# Altium integrated library loz-old-man.IntLib: 86 symbols (part 1 of 3)
Pins are listed as number, name and electrical type; pins without a type are passive.

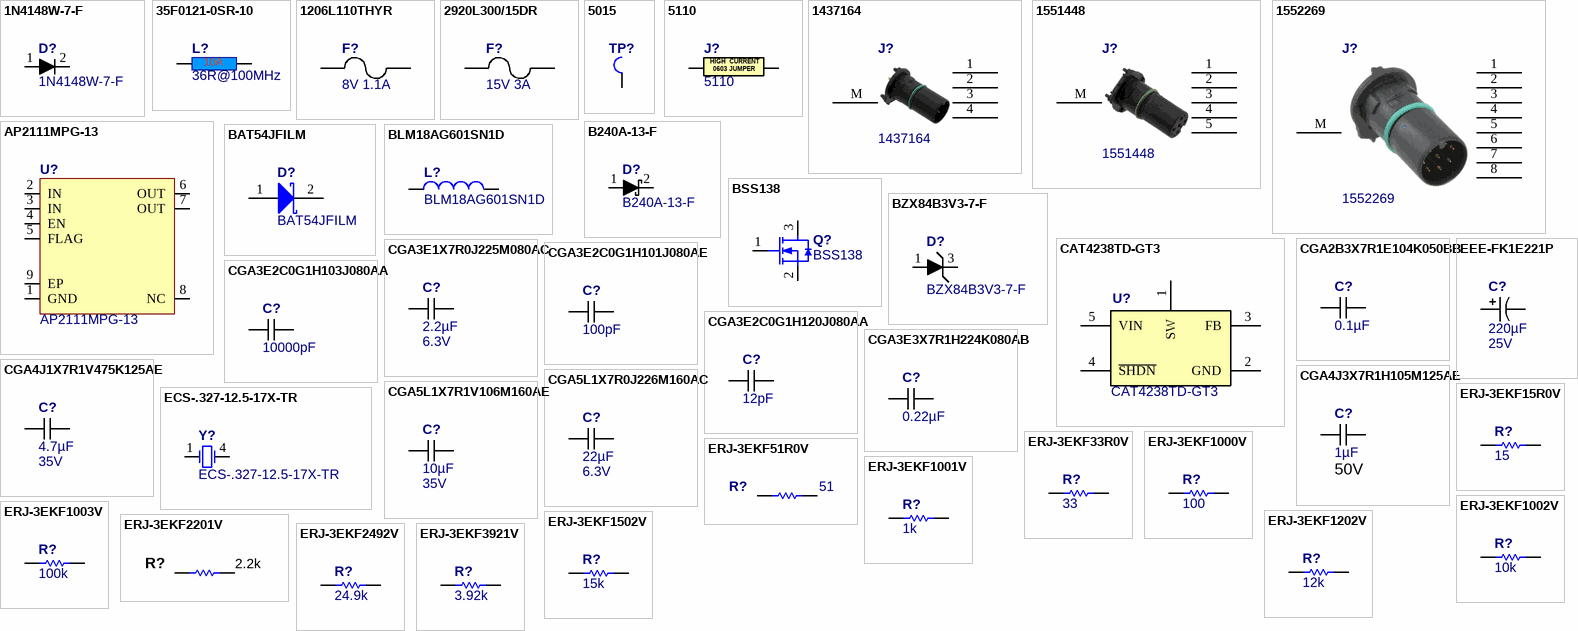
[diagram p0: symbols 1N4148W-7-F to ERJ-3EKF3921V]

## 1N4148W-7-F
designator D?
DIODE SWITCH 100V 150MA SOD123; Manufacturer: Diodes Inc; CategorySort: 400; Diode Type: Standard; Voltage - Forward (Vf) (Max) @ If: 1.25V @ 150mA; Speed: Small Signal =< 200mA (Io)- Any Speed; Reverse Recovery Time (trr): 4ns; Current - Reverse Leakage @ Vr: 1µA @ 75V; Capacitance @ Vr- F: 2pF @ 0V- 1MHz; Num Pins: 2; Diode Suffix: 1A_2C; Category: Diodes; Value: 1N4148W-7-F; Manufacturer Part Number: 1N4148W-7-F; ComponentLink1Description: Internal Datasheet; ComponentLink1URL: http://www.diodes.com/datasheets/ds30086.pdf; ComponentLink2Description: External Datasheet; ComponentLink2URL: http://www.diodes.com/datasheets/ds30086.pdf; Supplier 1: Digi-Key; Supplier Part Number 1: 1N4148W-FDICT-ND; SortValue: 1N4148W-7-F; Voltage - DC Reverse (Vr) (Max): 100V; Current - Average Rectified (Io): 150mA; Mounting Type: Surface Mount; Package: SOD-123; Supplier Device Package: SOD-123; Packaging: Cut Tape (CT)
footprint D_SOD-123_P
footprint -
pins: 1 A, 2 K

## 35F0121-0SR-10
designator L?, comment 36R@100MHz
Power Supply FB 10A; Manufacturer Part No.: 35F0121-0SR-10; Manufacturer Name: Laird; Manufacturer: Laird Steward; Tolerance: 25%; Core Material: Ferrite; Impedance: 41R; Resistance: 42R; Number of Lines: 1; DC Resistance (DCR): 0.75mR; Test Frequency: 100MHz; Frequency: 10MHz; Rating: 10A; Supplier 1: Digi-Key; Supplier Part Number 1: 240-2520-1-ND; Manufacturer Part Number: 35F0121-0SR-10; Stock: 289479; Pricing: 1 = 0.29000, 10 = 0.22600, 25 = 0.18760, 50 = 0.16160, 100 = 0.14540, 250 = 0.12280, 500 = 0.10988, 1000 = 0.09371 (USD); Mount: Surface Mount; Case/Package: SMD/SMT; Weight: 0.00512oz; Case Code (Metric): 4131; Case Code (Imperial): 1612; Min Operating Temperature: -40°C; Max Operating Temperature: 125°C; Package Quantity: 2500; Packaging: Tape and Reel; Max Current Rating: 10A; Max DC Current: 10A; Termination: SMD/SMT; Length: 0.16inch; Height: 0.12inch; Width: 0.12inch; Depth: 3.05mm; Lead Free: Lead Free; ComponentLink1URL: http://lairdtech.thomasnet.com/Asset/35F0121-0SR-10-C-2-VP.pdf; ComponentLink1Description: http://lairdtech.thomasnet.com/Asset/35F0121-0SR-10-C-2-VP.pdf; ComponentLink2URL: http://datasheet.octopart.com/35F0121-0SR-10-Steward-datasheet-65778.pdf; ComponentLink2Description: http://datasheet.octopart.com/35F0121-0SR-10-Steward-datasheet-65778.pdf; ComponentLink3URL: http://datasheet.octopart.com/35F0121-0SR-10-Steward-datasheet-153820.pdf; ComponentLink3Description: http://datasheet.octopart.com/35F0121-0SR-10-Steward-datasheet-153820.pdf; ComponentLink4URL: http://datasheet.octopart.com/35F0121-0SR-10-Steward-datasheet-14434158.pdf; ComponentLink4Description: http://datasheet.octopart.com/35F0121-0SR-10-Steward-datasheet-14434158.pdf; Value: 36R@100MHz
footprint T_Laird_35F0121-0SR-10 (Power supply FB 10A)
pins: 1, 2

## 1206L110THYR
designator F?, comment 8V 1.1A
FUSE PTC RESET 8V 1.10A 1206; Manufacturer Part Number: 1206L110THYR; Manufacturer: Littelfuse Inc; CategorySort: 850; Current - Trip (It): 2.2A; Current - Max: 100A; R Min/Max: 0.040 ~ 0.180 Ohm; Time to Trip: 0.1s; Current Trip: 1.1; Value: 8V 1.1A; Sort Value: *; Category: Circuit Protection; ComponentLink1Description: Internal Datasheet; ComponentLink1URL: http://www.littelfuse.com/data/en/Data_Sheets/Littelfuse_PTC_1206L.pdf; ComponentLink2Description: External Datasheet; ComponentLink2URL: http://www.littelfuse.com/data/en/Data_Sheets/Littelfuse_PTC_1206L.pdf; Supplier 1: Digi-Key; Supplier Part Number 1: F3371CT-ND; SortValue: 8_1.1; Current - Hold (Ih) (Max): 1.1A; Voltage - Max: 8V; Package: 1206 (3216 Metric)- Concave- Long Side Terminals; Packaging: Cut Tape (CT); Footprint: 1206
footprint F_PTC_1206
footprint -
pins: 1, 2

## 2920L300/15DR
designator F?, comment 15V 3A
PTC RESETTABLE 15V 3A SMD 2920; Manufacturer Part Number: 2920L300/15DR; Manufacturer: Littelfuse Inc; CategorySort: 850; Current - Trip (It): 5A; Current - Max: 40A; R Min/Max: 0.015 ~ 0.048 Ohm; Time to Trip: 20s; Current Trip: 3; Value: 15V 3A; Sort Value: *; Category: Circuit Protection; ComponentLink1Description: Internal Datasheet; ComponentLink1URL: http://www.littelfuse.com/data/en/Data_Sheets/Littelfuse_PTC_2920L.pdf; ComponentLink2Description: External Datasheet; ComponentLink2URL: http://www.littelfuse.com/data/en/Data_Sheets/Littelfuse_PTC_2920L.pdf; Supplier 1: Digi-Key; Supplier Part Number 1: F2875CT-ND; SortValue: 15_3; Current - Hold (Ih) (Max): 3A; Voltage - Max: 15V; Package: 2920 (7351 Metric)- Concave; Packaging: Cut Tape (CT); Footprint: 2920
footprint F_PTC_2920
footprint -
pins: 1, 2

## 5015
designator TP?, comment PC TEST POINT MINIATURE SMT  (value not drawn)
Manufacturer: Keystone Electronics; Manufacturer Part Number: 5015; ROHS Certificate: *; Value: PC TEST POINT MINIATURE SMT; Pricing: *; Supplier 1: Digi-Key; Supplier Part Number 1: 36-5015CT-ND; RoHS: RoHS Compliant; Category: Test and Measurement; Type: PC Test Point, Miniature; Terminal: 0.010" (0.25mm) Phosphor Bronze, Silver Plate; Mounting Type: Surface Mount; Material: Phosphor Bronze; Color: -; Packaging: Cut Tape (CT); ComponentLink1URL: http://mail.keyelco.com/ENG._DEPT/PDF%20CAT%20NO%20Drawings/5015.pdf; ComponentLink1Description: http://mail.keyelco.com/ENG._DEPT/PDF%20CAT%20NO%20Drawings/5015.pdf
footprint SMT_TEST_5015 (SMT_TEST)
pins: 1

## 5110
designator J?
0603 Solid High Current Jumper; Manufacturer: Keystone Electronics; Resistance (Ohms): 0.0; Power (Watts): 0.5W, 1/2W; Supplier 1: Digi-Key; Supplier Part Number 1: 36-5110CT-ND; Manufacturer Part Number: 5110; RoHS: RoHS Compliant; Category: 5110; Stock 1: 23484; Pricing 1: 1=0.41, 10=0.384, 50=0.28, 100=0.2691, 250=0.24164, 500=0.23066 (USD); Packaging: Cut Tape (CT); Tolerance: Jumper; Composition: Thick Film; Features: -; Temperature Coefficient: -; Operating Temperature: -; Package / Case: 0603 (1608 Metric); Supplier Device Package: 0603; Size / Dimension: 0.061" L x 0.033" W (1.55mm x 0.85mm); Height: 0.028" (0.70mm); Number of Terminations: 2; ComponentLink1URL: http://www.keyelco.com/product-pdf.cfm?p=14038; ComponentLink1Description: http://www.keyelco.com/product-pdf.cfm?p=14038; Value: 5110
footprint C0603_0.9mm (Chip Capacitor, Body 1.6x0.9mm, IPC High Density)
pins: 1, 2
text: HIGH; CURRENT; 0603 JUMPER

## 1437164
designator J?
Circular Metric Connectors SACC-CI-M12MS- 4CON-L180 THR; Manufacturer: Phoenix Contact; Current Rating: 4A; Voltage Rating: 250V; Number of Contacts: 4; Connector Type: Plug; Gender: Female; Strain Relief: No (Without); Number of Ports: 1; Thread Size: M12; Ratings: IP67,Waterproof,Dust Tight; Value: 1437164; Supplier 1: Digi-Key; Manufacturer Part Number: 1437164; Stock 1: 71; Pricing 1: 1=6.15000, 10=5.88500, 50=5.72500, 100=5.35040, 250=4.92240, 500=4.54784, 1000=4.33387, 2500=3.87875 (USD); RoHS: Yes; Mount: Through Hole; Contact Material: Brass; Contact Plating: Gold; Housing Material: Polyamide; Number of Terminals: 4; Min Operating Temperature: -25°C; Max Operating Temperature: 85°C; Packaging: Tray; Max Current Rating: 4A; Termination: Solder; Package Quantity: 60; Contact Gender: Male; Number of Positions: 4; Orientation: Straight; Fastening Type: Threaded; ComponentLink1URL: https://datasheet.ciiva.com/16136/1437164-16136065.pdf?src-supplier=Onlinecomponents.com; ComponentLink1Description: https://datasheet.ciiva.com/16136/1437164-16136065.pdf?src-supplier=Onlinecomponents.com; ComponentLink2URL: https://datasheet.ciiva.com/29256/586130-da-01-en-sens-akt-einbaust-4pol-1437164-60-st-29256645.pdf?src-supplier=Conrad; ComponentLink2Description: https://datasheet.ciiva.com/29256/586130-da-01-en-sens-akt-einbaust-4pol-1437164-60-st-29256645.pdf?src-supplier=Conrad; Supplier Part Number 1: 277-13184-ND
footprint 1437164 (CONN MALE INSERT 4POS GOLD SLDR)
pins: 1, 2, 3, 4, M

## 1551448
designator J?
Flush-type connector SACC-CI-M12FS-5CON-L180-THR 1551448 Phoenix Contact; Plating: Polyamide; Number of Positions: 5; Current Rating: 4A; Voltage Rating: 60V; Connector Type: Receptacle; Number of Ports: 1; Thread Size: M12; Ratings: IP67,Waterproof,Dust Tight; Value: 1551448; Supplier 1: Digi-Key; Supplier Part Number 1: 277-13414-ND; Manufacturer: Phoenix Contact; Manufacturer Part Number: 1551448; Stock: 70; Pricing: 1=8.12, 10=7.771, 50=7.5588, 100=7.0642, 250=6.4991, 500=6.0046, 1000=5.722, 2500=5.3688 (USD); RoHS: Yes; Mount: Through Hole; Weight: 0.123459oz; Contact Plating: Gold; Contact Material: Brass; Number of Terminals: 5; Min Operating Temperature: -25°C; Max Operating Temperature: 85°C; Packaging: Tray; Number of Contacts: 5; Contact Gender: Female; Termination: Solder; Package Quantity: 60; Fastening Type: Threaded; Orientation: Straight; Max Current Rating: 4A; Lead Free: Lead Free; ComponentLink1URL: https://datasheet.ciiva.com/618/1551448-618993.pdf?src-supplier=Digi-Key; ComponentLink1Description: https://datasheet.ciiva.com/618/1551448-618993.pdf?src-supplier=Digi-Key; ComponentLink2URL: https://datasheet.ciiva.com/24433/1551448-24433704.pdf?src-supplier=Onlinecomponents.com; ComponentLink2Description: https://datasheet.ciiva.com/24433/1551448-24433704.pdf?src-supplier=Onlinecomponents.com; ComponentLink3URL: https://datasheet.ciiva.com/29259/719975-da-01-en-sens-akt-einbaubuch-5pol-1551448-60-st-29259372.pdf?src-supplier=Conrad; ComponentLink3Description: https://datasheet.ciiva.com/29259/719975-da-01-en-sens-akt-einbaubuch-5pol-1551448-60-st-29259372.pdf?src-supplier=Conrad
footprint 1551448
pins: 1, 2, 3, 4, 5, M

## 1552269
designator J?
Circular Metric Connectors SACC-DSI-FSD -4CON-PG9/0,5 SCO; Manufacturer: Phoenix Contact; Current Rating: 2A; Voltage Rating: 30V; Number of Positions: 8; Connector Type: Plug; Strain Relief: No (Without); Thread Size: M12; Ratings: IP67,Waterproof,Dust Tight; Value: 1552269; Supplier 1: Digi-Key; Supplier Part Number 1: 277-8390-ND; Manufacturer Part Number: 1552269; RoHS: Yes; Category: Circular Connectors; Stock: 60; Pricing: 1=11.18000, 10=10.69000, 50=10.39880, 100=9.71850, 250=8.94108, 500=8.26078, 1000=7.87201 (USD); Mount: Through Hole; Weight: 0.128397oz; Contact Plating: Gold; Contact Material: Brass; Min Operating Temperature: -25°C; Max Operating Temperature: 85°C; Packaging: Tray; Package Quantity: 1; Fastening Type: Threaded; Termination: Solder; Number of Contacts: 8; Max Current Rating: 2A; Contact Gender: Female; Orientation: Straight; Radiation Hardening: No; Lead Free: Lead Free; ComponentLink1URL: https://datasheet.ciiva.com/15179/getdatasheetpartid-320397-15179574.pdf?src-supplier=Verical; ComponentLink1Description: https://datasheet.ciiva.com/15179/getdatasheetpartid-320397-15179574.pdf?src-supplier=Verical
footprint 1552269 (CONN MALE INSERT 8POS GOLD SLDR)
pins: 1, 2, 3, 4, 5, 6, 7, 8, M

## AP2111MPG-13
designator U?
IC USB SWITCH 2.45A CURR 8MSOP; Manufacturer: Diodes; CategorySort: 600; Packaging 1: Tape and Reel; Number of Outputs: 1; Max Output Current: 2A; Min Input Voltage: 2.5V; Max Input Voltage: 6V; Quiescent Current: 55uA; Accuracy: 1.5%; Output Type: Fixed; Interface: On/Off; Fault Protection: Over Temperature,Reverse Current; Output Configuration: High Side; Operating Supply Current: 45uA; Category: Integrated Circuits; Value: AP2111MPG-13; Supplier 1: Digi-Key; Supplier Part Number 1: AP2111MPG-13DICT-ND; Manufacturer Part Number: AP2111MPG-13; Stock 1: 1715; Pricing 1: 1=0.46000, 10=0.39000, 100=0.29120, 500=0.22880, 1000=0.17680 (USD); RoHS: Yes; Mount: Surface Mount; Case/Package: MSOP; Number of Pins: 8; Contact Plating: Tin,Matte; Min Operating Temperature: -35°C; Max Operating Temperature: 85°C; Package Quantity: 2500; Radiation Hardening: No; REACH SVHC: No SVHC; Lead Free: Lead Free; ComponentLink1URL: https://datasheet.ciiva.com/3234/ap2101-2111-3234512.pdf?src-supplier=Avnet; ComponentLink1Description: https://datasheet.ciiva.com/3234/ap2101-2111-3234512.pdf?src-supplier=Avnet; ComponentLink2URL: https://datasheet.ciiva.com/15108/getdatasheetpartid-661766-15108856.pdf?src-supplier=Verical; ComponentLink2Description: https://datasheet.ciiva.com/15108/getdatasheetpartid-661766-15108856.pdf?src-supplier=Verical; ComponentLink3URL: https://datasheet.ciiva.com/1962/ap2101-2111-1962212.pdf?src-supplier=Digi-Key; ComponentLink3Description: https://datasheet.ciiva.com/1962/ap2101-2111-1962212.pdf?src-supplier=Digi-Key; ComponentLink4URL: https://datasheet.ciiva.com/12183/ap2101-2111-12183962.pdf?src-supplier=Mouser; ComponentLink4Description: https://datasheet.ciiva.com/12183/ap2101-2111-12183962.pdf?src-supplier=Mouser
footprint MSOP-8E (8-Lead Plastic MSOP, Exposed Die Pad)
pins: 1 GND, 2 IN, 3 IN, 4 EN, 5 FLAG, 6 OUT, 7 OUT, 8 NC, 9 EP

## B240A-13-F
designator D?
DIODE SCHOTTKY 40V 2A SMA; Manufacturer: Diodes Inc; CategorySort: 400; Voltage - Forward (Vf) (Max) @ If: 500mV @ 2A; Speed: Fast Recovery =< 500ns- > 200mA (Io); Current - Reverse Leakage @ Vr: 500µA @ 40V; Capacitance @ Vr- F: 200pF @ 4V- 1MHz; Num Pins: 2; Diode Suffix: 1A_2C; Category: Diodes; Value: B240A-13-F; Manufacturer Part Number: B240A-13-F; ComponentLink1Description: Internal Datasheet; ComponentLink1URL: http://www.diodes.com/datasheets/ds13004.pdf; ComponentLink2Description: External Datasheet; ComponentLink2URL: http://www.diodes.com/datasheets/ds13004.pdf; Stocked: -; Supplier 1: Digi-Key; Supplier Part Number 1: B240A-FDICT-ND; SortValue: B240A-13-F; Pricing: 1 = 0.54  ;  10 = 0.38  ;  25 = 0.312  ;  100 = 0.2492  ;  250 = 0.18152  ;  500 = 0.1474  ;  1000 = 0.1133  ;  2500 = 0.10175 (USD); Sales Status: Active; Diode Type: Schottky; Voltage - DC Reverse (Vr) (Max): 40V; Current - Average Rectified (Io): 2A; Reverse Recovery Time (trr): -; Mounting Type: Surface Mount; Package: DO-214AC- SMA; Supplier Device Package: SMA; Packaging: Cut Tape (CT)
footprint D_SMA_P
footprint -
pins: 1 A, 2 K

## BAT54JFILM
designator D?
DIODE SCHOTTKY 40V 300MA SOD323; Manufacturer: STMicroelectronics; CategorySort: 400; Reverse Recovery Time: 5ns; Peak Non-Repetitive Surge Current: 1A; Element Configuration: Single; Forward Voltage: 900mV; Packaging 1: Tape and Reel; Max Reverse Leakage Current: 1uA; Peak Reverse Current: 100uA; Polarity: Standard; Voltage Rating (DC): 30V; Capacitance: 10pF; Category: Diodes; Value: BAT54JFILM; Supplier 1: Digi-Key; Supplier Part Number 1: 497-7163-1-ND; Manufacturer Part Number: BAT54JFILM; Stock 1: 46673; Pricing 1: 1=0.36000, 10=0.29200, 100=0.11960, 500=0.09978, 1000=0.06933 (USD); RoHS: Yes; Mount: Surface Mount; Case/Package: SC; Number of Pins: 2; Weight: 0.01lb; Contact Plating: Tin,Matte; Min Operating Temperature: -40°C; Max Operating Temperature: 150°C; Forward Current: 300mA; Max Repetitive Reverse Voltage (Vrrm): 40V; Max Surge Current: 1A; Package Quantity: 1; Recovery Time: 5ns; Average Rectified Current: 300mA; Max Forward Surge Current (Ifsm): 1A; Termination: SMD/SMT; Output Current: 300mA; Current Rating: 300mA; Max Reverse Voltage (DC): 40V; Length: 1.8mm; Height: 1.07mm; Width: 1.45mm; Radiation Hardening: No; REACH SVHC: No SVHC; Lead Free: Lead Free; ComponentLink1URL: https://datasheet.ciiva.com/1177/1689724-1177952.pdf?src-supplier=Element14; ComponentLink1Description: https://datasheet.ciiva.com/1177/1689724-1177952.pdf?src-supplier=Element14; ComponentLink2URL: https://datasheet.ciiva.com/1200/1689724-1200625.pdf?src-supplier=Farnell; ComponentLink2Description: https://datasheet.ciiva.com/1200/1689724-1200625.pdf?src-supplier=Farnell; ComponentLink3URL: https://datasheet.ciiva.com/1200/cd00001322-1200626.pdf?src-supplier=Farnell; ComponentLink3Description: https://datasheet.ciiva.com/1200/cd00001322-1200626.pdf?src-supplier=Farnell; ComponentLink4URL: https://datasheet.ciiva.com/15192/getdatasheetpartid-185078-15192983.pdf?src-supplier=Verical; ComponentLink4Description: https://datasheet.ciiva.com/15192/getdatasheetpartid-185078-15192983.pdf?src-supplier=Verical; ComponentLink5URL: https://datasheet.ciiva.com/915/cd00001322-915529.pdf?src-supplier=Digi-Key; ComponentLink5Description: https://datasheet.ciiva.com/915/cd00001322-915529.pdf?src-supplier=Digi-Key; ComponentLink6URL: https://datasheet.ciiva.com/25954/cd00001322-25954459.pdf?src-supplier=Avnet+Europe; ComponentLink6Description: https://datasheet.ciiva.com/25954/cd00001322-25954459.pdf?src-supplier=Avnet+Europe; ComponentLink7URL: https://datasheet.ciiva.com/1177/1689724-1177950.pdf?src-supplier=Element14; ComponentLink7Description: https://datasheet.ciiva.com/1177/1689724-1177950.pdf?src-supplier=Element14; ComponentLink8URL: https://datasheet.ciiva.com/915/cd00001322-915527.pdf?src-supplier=Digi-Key; ComponentLink8Description: https://datasheet.ciiva.com/915/cd00001322-915527.pdf?src-supplier=Digi-Key; ComponentLink9URL: https://datasheet.ciiva.com/915/cd00001322-915528.pdf?src-supplier=Digi-Key; ComponentLink9Description: https://datasheet.ciiva.com/915/cd00001322-915528.pdf?src-supplier=Digi-Key; ComponentLink10URL: https://datasheet.ciiva.com/1177/1689724-1177951.pdf?src-supplier=Element14; ComponentLink10Description: https://datasheet.ciiva.com/1177/1689724-1177951.pdf?src-supplier=Element14; ComponentLink11URL: https://datasheet.ciiva.com/7622/1689724-7622351.pdf?src-supplier=Element14; ComponentLink11Description: https://datasheet.ciiva.com/7622/1689724-7622351.pdf?src-supplier=Element14
footprint SOD-323 (SOD323 Diode)
pins: 1 A, 2 K

## BLM18AG601SN1D
designator L?
FERRITE CHIP 600 OHM 500MA 0603; Manufacturer: Murata Electronics North America; CategorySort: 300; Impedance @ Frequency: 600 Ohm @ 100MHz; DC Resistance (DCR): 380 mOhm Max; Filter Type: Differential Mode - Single; Value: BLM18AG601SN1D; Sort Value: *; Category: Inductors; Supplier 1: Digi-Key; Supplier Part Number 1: 490-1014-1-ND; Manufacturer Part Number: BLM18AG601SN1D; RoHS: RoHS Compliant; Stock 1: 139441; Pricing 1: 1=0.1, 10=0.079, 50=0.0648, 100=0.0476, 250=0.0346, 500=0.0317, 1000=0.02738 (USD); Current Rating: 500mA; Package: 0603 (1608 Metric); Mounting Type: Surface Mount; Packaging: Cut Tape (CT); Height (Max): 0.037" (0.95mm); Size / Dimension: 0.063" L x 0.031" W (1.60mm x 0.80mm); ComponentLink1URL: http://search.murata.co.jp/Ceramy/image/img/PDF/ENG/L0110S0100BLM18A.pdf; ComponentLink1Description: http://search.murata.co.jp/Ceramy/image/img/PDF/ENG/L0110S0100BLM18A.pdf
footprint L_0603_0.8mm (Inductor 0603 0.8mmTall)
pins: 1, 2

## BSS138
designator Q?
FAIRCHILD SEMICONDUCTOR - BSS138 - N CHANNEL MOSFET, 50V, 220mA SOT-23; CategorySort: 500; Value: BSS138; Sort Value: *; Category: Semiconductors; Supplier 1: Newark; Manufacturer: FAIRCHILD SEMICONDUCTOR; Manufacturer Part Number: BSS138; RoHS: YES; Stock 1: 17000; Pricing 1: 1=0.077, 25=0.064, 100=0.049, 250=0.039, 500=0.035, 1000=0.03 (USD); ComponentLink1URL: http://www.fairchildsemi.com/ds/BS/BSS138.pdf; ComponentLink1Description: http://www.fairchildsemi.com/ds/BS/BSS138.pdf; Supplier Part Number 1: 58K8769; Package: SOT-23
footprint SOT23_Medium (SOT23, 3-Leads, Body 2.9x1.3mm, Pitch 0.95mm, Lead Span 2.4mm, IPC Medium Density)
pins: 1 G, 2 S, 3 D

## BZX84B3V3-7-F
designator D?
DIODE ZENER 3.3V 300MW SOT23; Manufacturer: Diodes Inc; CategorySort: 400; Voltage - Forward (Vf) (Max) @ If: 900mV @ 10mA; Current - Reverse Leakage @ Vr: 5µA @ 1V; Tolerance: ±2%; Impedance (Max) (Zzt): 95 Ohm; Num Pins: 3; Diode Suffix: 1A_3C; Library Ref ARL: ARL_DZ_1A_3C; Category: Diodes; Value: BZX84B3V3-7-F; Manufacturer Part Number: BZX84B3V3-7-F; ComponentLink1Description: Internal Datasheet; ComponentLink1URL: http://www.diodes.com/datasheets/BZX84Bxx(x).pdf; ComponentLink2Description: External Datasheet; ComponentLink2URL: http://www.diodes.com/datasheets/BZX84Bxx(x).pdf; Stocked: 0; Supplier 1: Digi-Key; Supplier Part Number 1: BZX84B3V3-FDICT-ND; SortValue: BZX84B3V3-7-F; Pricing: 1 = 0.19  ;  10 = 0.177  ;  25 = 0.1612  ;  100 = 0.1159  ;  250 = 0.06824  ;  500 = 0.05662  ;  1000 = 0.03863 (USD); Sales Status: Active; Voltage - Zener (Nom) (Vz): 3.3V; Power - Max: 300mW; Mounting Type: Surface Mount; Package: TO-236-3- SC-59- SOT-23-3; Supplier Device Package: SOT-23-3; Packaging: Cut Tape (CT); Operating Temperature: -65°C ~ 150°C; MANUFACTURER_P_N: BZX84B3V3-7-F
footprint D_SOT-23-3_P
footprint -
pins: 1 A, 3 K

## CAT4238TD-GT3
designator U?
IC LED DRIVER RGLTR DIM TSOT23-5; Manufacturer: ON Semiconductor; Output Current: 450mA; Output Voltage: 38V; Max Supply Voltage: 5.5V; Number of Outputs: 1; Frequency: 1.3MHz; Min Input Voltage: 2V; Switching Frequency: 1MHz; Max Supply Current: 1.5mA; High Level Output Current: 40mA; Number of Segments: 10; Topology: Boost; Min Supply Voltage: 2.8V; Current Rating: 30mA; Efficiency: 87%; Min Output Voltage: 0uV; Value: CAT4238TD-GT3; Supplier 1: Digi-Key; Supplier Part Number 1: CAT4238TD-GT3CT-ND; Manufacturer Part Number: CAT4238TD-GT3; RoHS: Yes; Category: Embedded Processors and Controllers; Stock: 29128; Pricing: 1=1.08000, 10=0.96100, 100=0.70040, 500=0.58642, 1000=0.45611 (USD); Case/Package: TSOT; Number of Pins: 5; Contact Plating: Gold; Min Operating Temperature: -40°C; Max Operating Temperature: 85°C; Package Quantity: 1; Max Input Voltage: 5.5V; Packaging: Tape and Reel; Output Current per Channel: 40mA; Max Output Voltage: 38V; Nominal Supply Current: 1.5mA; Termination: SMD/SMT; Radiation Hardening: No; REACH SVHC: No SVHC; Lead Free: Lead Free; Halogen Free: Halogen Free; ComponentLink1URL: https://datasheet.ciiva.com/4426/cat4238-d-109064-4426950.pdf?src-supplier=Mouser; ComponentLink1Description: https://datasheet.ciiva.com/4426/cat4238-d-109064-4426950.pdf?src-supplier=Mouser; ComponentLink2URL: https://datasheet.ciiva.com/1552/83817-1552601.pdf?src-supplier=Farnell; ComponentLink2Description: https://datasheet.ciiva.com/1552/83817-1552601.pdf?src-supplier=Farnell; ComponentLink3URL: https://datasheet.ciiva.com/15135/getdatasheetpartid-558497-15135587.pdf?src-supplier=Verical; ComponentLink3Description: https://datasheet.ciiva.com/15135/getdatasheetpartid-558497-15135587.pdf?src-supplier=Verical; ComponentLink4URL: https://datasheet.ciiva.com/5775/cat4238-d-5775332.pdf?src-supplier=Farnell; ComponentLink4Description: https://datasheet.ciiva.com/5775/cat4238-d-5775332.pdf?src-supplier=Farnell; ComponentLink5URL: https://datasheet.ciiva.com/26878/cat4238td-gt3-26878318.pdf?src-supplier=IIIC; ComponentLink5Description: https://datasheet.ciiva.com/26878/cat4238td-gt3-26878318.pdf?src-supplier=IIIC; ComponentLink6URL: https://datasheet.ciiva.com/16387/cat4238-d-16387237.pdf?src-supplier=Future+Electronics; ComponentLink6Description: https://datasheet.ciiva.com/16387/cat4238-d-16387237.pdf?src-supplier=Future+Electronics; ComponentLink7URL: https://datasheet.ciiva.com/1945/cat4238-d-1945306.pdf?src-supplier=Digi-Key; ComponentLink7Description: https://datasheet.ciiva.com/1945/cat4238-d-1945306.pdf?src-supplier=Digi-Key; ComponentLink8URL: https://datasheet.ciiva.com/46408/cat4238-d-46408090.pdf?src-supplier=Element14; ComponentLink8Description: https://datasheet.ciiva.com/46408/cat4238-d-46408090.pdf?src-supplier=Element14; ComponentLink9URL: https://datasheet.ciiva.com/1945/cat4238-d-1945307.pdf?src-supplier=Digi-Key; ComponentLink9Description: https://datasheet.ciiva.com/1945/cat4238-d-1945307.pdf?src-supplier=Digi-Key; ComponentLink10URL: https://datasheet.ciiva.com/26062/cat4238-d-26062715.pdf?src-supplier=Avnet+Europe; ComponentLink10Description: https://datasheet.ciiva.com/26062/cat4238-d-26062715.pdf?src-supplier=Avnet+Europe; ComponentLink11URL: https://datasheet.ciiva.com/1497/cat4238-d-1497804.pdf?src-supplier=Element14; ComponentLink11Description: https://datasheet.ciiva.com/1497/cat4238-d-1497804.pdf?src-supplier=Element14; ComponentLink12URL: https://datasheet.ciiva.com/1945/cat4238-d-1945308.pdf?src-supplier=Digi-Key; ComponentLink12Description: https://datasheet.ciiva.com/1945/cat4238-d-1945308.pdf?src-supplier=Digi-Key; ComponentLink13URL: https://datasheet.ciiva.com/3165/cat4238-d-3165884.pdf?src-supplier=Avnet; ComponentLink13Description: https://datasheet.ciiva.com/3165/cat4238-d-3165884.pdf?src-supplier=Avnet; ComponentLink14URL: https://datasheet.ciiva.com/7650/83817-7650460.pdf?src-supplier=Element14; ComponentLink14Description: https://datasheet.ciiva.com/7650/83817-7650460.pdf?src-supplier=Element14
footprint SOT23-5 (SOT23, 5-Leads, Body 3.1x2.6mm (max), Pitch 0.95mm, IPC High Density)
pins: 1 SW, 2 GND, 3 FB, 4 ~{SHDN}, 5 VIN

## CGA2B3X7R1E104K050BB
designator C?, comment 0.1µF
CAP CER 0.1UF 25V X7R 0402; Manufacturer Part Number: CGA2B3X7R1E104K050BB; Manufacturer: TDK Corporation; Tolerance: ±10%; Substitution Notes: 0.1µF , 25V , ±10% , X7R , -55°C ~ 125°C , AEC-Q200 , 0402; Value: 0.1µF; Temperature Coefficient: X7R; ComponentLink1Description: Datasheet (Internal); ComponentLink1URL: datasheets\TDK\mlcc_automotive_general_en.pdf; ComponentLink2Description: Datasheet (External); ComponentLink2URL: https://product.tdk.com/info/en/catalog/datasheets/mlcc_automotive_general_en.pdf; Supplier 1: Digikey; Supplier Part Number 1: 445-6902-1-ND; Category: Capacitors; Voltage - Rated: 25V; Features: -; Operating Temperature: -55°C ~ 125°C; Ratings: AEC-Q200; Package: 0402; Thickness (Max): 0.55MM
footprint C0402_0.55MM_MD
footprint C0402_0.55MM_HD
footprint C0402_0.55MM_LD
pins: 1, 2 1

## CGA3E1X7R0J225M080AC
designator C?, comment 2.2µF  Voltage - Rated: 6.3V
CAP CER 2.2UF 6.3V X7R 0603; Manufacturer Part Number: CGA3E1X7R0J225M080AC; Manufacturer: TDK Corporation; Tolerance: ±20%; Substitution Notes: 2.2µF , 6.3V , ±20% , X7R , -55°C ~ 125°C , AEC-Q200 , 0603; Value: 2.2µF; Temperature Coefficient: X7R; ComponentLink1Description: Datasheet (Internal); ComponentLink1URL: datasheets\TDK\mlcc_automotive_general_en.pdf; ComponentLink2Description: Datasheet (External); ComponentLink2URL: https://product.tdk.com/info/en/catalog/datasheets/mlcc_automotive_general_en.pdf; Supplier 1: Digikey; Supplier Part Number 1: 445-12572-1-ND; Category: Capacitors; Operating Temperature: -55°C ~ 125°C; Ratings: AEC-Q200; Package: 0603; Thickness (Max): 0.90MM; Features: -
footprint C0603_0.90MM_MD
footprint C0603_0.90MM_HD
footprint C0603_0.90MM_LD
pins: 1, 2 1

## CGA3E2C0G1H101J080AE
designator C?, comment 100pF
CAP CER 100PF 50V NP0 0603; Manufacturer Part Number: CGA3E2C0G1H101J080AE; Manufacturer: TDK Corporation; Temperature Coefficient: C0G, NP0; Tolerance: ±5%; Substitution Notes: 100pF , 50V , ±5% , C0G, NP0 , -55°C ~ 125°C , AEC-Q200 , 0603; Value: 100pF; ComponentLink1Description: Datasheet (Internal); ComponentLink1URL: datasheets\TDK\mlcc_automotive_general_en.pdf; ComponentLink2Description: Datasheet (External); ComponentLink2URL: https://product.tdk.com/info/en/catalog/datasheets/mlcc_automotive_general_en.pdf; Supplier 1: Digikey; Supplier Part Number 1: 445-173653-1-ND; Category: Capacitors; Voltage - Rated: 50V; Operating Temperature: -55°C ~ 125°C; Ratings: AEC-Q200; Package: 0603; Thickness (Max): 0.95MM; Features: Soft Termination
footprint C0603_0.95MM_MD
footprint C0603_0.95MM_HD
footprint C0603_0.95MM_LD
pins: 1, 2 1

## CGA3E2C0G1H103J080AA
designator C?, comment 10000pF
CAP CER 10000PF 50V C0G 0603; Manufacturer Part Number: CGA3E2C0G1H103J080AA; Manufacturer: TDK Corporation; Temperature Coefficient: C0G, NP0; Tolerance: ±5%; Substitution Notes: 10000pF , 50V , ±5% , C0G, NP0 , -55°C ~ 125°C , AEC-Q200 , 0603; Value: 10000pF; ComponentLink1Description: Datasheet (Internal); ComponentLink1URL: datasheets\TDK\mlcc_automotive_general_en.pdf; ComponentLink2Description: Datasheet (External); ComponentLink2URL: https://product.tdk.com/info/en/catalog/datasheets/mlcc_automotive_general_en.pdf; Supplier 1: Digikey; Supplier Part Number 1: 445-6916-1-ND; Category: Capacitors; Voltage - Rated: 50V; Features: -; Operating Temperature: -55°C ~ 125°C; Ratings: AEC-Q200; Package: 0603; Thickness (Max): 0.90MM
footprint C0603_0.90MM_HD
footprint C0603_0.90MM_MD
footprint C0603_0.90MM_LD
pins: 1, 2 1

## CGA3E2C0G1H120J080AA
designator C?, comment 12pF
CAP CER 12PF 50V C0G 0603; Manufacturer Part Number: CGA3E2C0G1H120J080AA; Manufacturer: TDK Corporation; Temperature Coefficient: C0G, NP0; Tolerance: ±5%; Substitution Notes: 12pF , 50V , ±5% , C0G, NP0 , -55°C ~ 125°C , AEC-Q200 , 0603; Value: 12pF; ComponentLink1Description: Datasheet (Internal); ComponentLink1URL: datasheets\TDK\mlcc_automotive_general_en.pdf; ComponentLink2Description: Datasheet (External); ComponentLink2URL: https://product.tdk.com/info/en/catalog/datasheets/mlcc_automotive_general_en.pdf; Supplier 1: Digikey; Supplier Part Number 1: 445-5629-1-ND; Category: Capacitors; Voltage - Rated: 50V; Operating Temperature: -55°C ~ 125°C; Ratings: AEC-Q200; Package: 0603; Thickness (Max): 0.90MM; Features: -
footprint C0603_0.90MM_MD
footprint C0603_0.90MM_HD
footprint C0603_0.90MM_LD
pins: 1, 2 1

## CGA3E3X7R1H224K080AB
designator C?, comment 0.22µF
CAP CER 0.22UF 50V X7R 0603; Manufacturer Part Number: CGA3E3X7R1H224K080AB; Manufacturer: TDK Corporation; Tolerance: ±10%; Substitution Notes: 0.22µF , 50V , ±10% , X7R , -55°C ~ 125°C , AEC-Q200 , 0603; Value: 0.22µF; Temperature Coefficient: X7R; ComponentLink1Description: Datasheet (Internal); ComponentLink1URL: datasheets\TDK\mlcc_automotive_general_en.pdf; ComponentLink2Description: Datasheet (External); ComponentLink2URL: https://product.tdk.com/info/en/catalog/datasheets/mlcc_automotive_general_en.pdf; Supplier 1: Digikey; Supplier Part Number 1: 445-6926-1-ND; Category: Capacitors; Voltage - Rated: 50V; Features: -; Operating Temperature: -55°C ~ 125°C; Ratings: AEC-Q200; Package: 0603; Thickness (Max): 0.90MM
footprint C0603_0.90MM_MD
footprint C0603_0.90MM_HD
footprint C0603_0.90MM_LD
pins: 1, 2 1

## CGA4J1X7R1V475K125AE
designator C?, comment 4.7µF  Voltage - Rated: 35V
CAP CER 4.7UF 35V X7R 0805; Manufacturer Part Number: CGA4J1X7R1V475K125AE; Manufacturer: TDK Corporation; Tolerance: ±10%; Substitution Notes: 4.7µF , 35V , ±10% , X7R , -55°C ~ 125°C , AEC-Q200 , 0805; Value: 4.7µF; Temperature Coefficient: X7R; ComponentLink1Description: Datasheet (Internal); ComponentLink1URL: datasheets\TDK\mlcc_automotive_general_en.pdf; ComponentLink2Description: Datasheet (External); ComponentLink2URL: https://product.tdk.com/info/en/catalog/datasheets/mlcc_automotive_general_en.pdf; Supplier 1: Digikey; Supplier Part Number 1: 445-172479-1-ND; Category: Capacitors; Features: Soft Termination; Operating Temperature: -55°C ~ 125°C; Ratings: AEC-Q200; Package: 0805; Thickness (Max): 1.50MM
footprint C0805_1.50MM_MD
footprint C0805_1.50MM_HD
footprint C0805_1.50MM_LD
pins: 1, 2 1

## CGA4J3X7R1H105M125AE
designator C?, comment 1µF  Voltage - Rated: 50V
CAP CER 1UF 50V X7R 0805; Manufacturer Part Number: CGA4J3X7R1H105M125AE; Manufacturer: TDK Corporation; Tolerance: ±20%; Substitution Notes: 1µF , 50V , ±20% , X7R , -55°C ~ 125°C , AEC-Q200 , 0805; Value: 1µF; Temperature Coefficient: X7R; ComponentLink1Description: Datasheet (Internal); ComponentLink1URL: datasheets\TDK\mlcc_automotive_general_en.pdf; ComponentLink2Description: Datasheet (External); ComponentLink2URL: https://product.tdk.com/info/en/catalog/datasheets/mlcc_automotive_general_en.pdf; Supplier 1: Digikey; Supplier Part Number 1: 445-7958-1-ND; Category: Capacitors; Features: Soft Termination; Operating Temperature: -55°C ~ 125°C; Ratings: AEC-Q200; Package: 0805; Thickness (Max): 1.50MM
footprint C0805_1.50MM_MD
footprint C0805_1.50MM_HD
footprint C0805_1.50MM_LD
pins: 1, 2 1

## CGA5L1X7R0J226M160AC
designator C?, comment 22µF  Voltage - Rated: 6.3V
CAP CER 22UF 6.3V X7R 1206; Manufacturer Part Number: CGA5L1X7R0J226M160AC; Manufacturer: TDK Corporation; Tolerance: ±20%; Substitution Notes: 22µF , 6.3V , ±20% , X7R , -55°C ~ 125°C , AEC-Q200 , 1206; Value: 22µF; Temperature Coefficient: X7R; ComponentLink1Description: Datasheet (Internal); ComponentLink1URL: datasheets\TDK\mlcc_automotive_general_en.pdf; ComponentLink2Description: Datasheet (External); ComponentLink2URL: https://product.tdk.com/info/en/catalog/datasheets/mlcc_automotive_general_en.pdf; Supplier 1: Digikey; Supplier Part Number 1: 445-7884-1-ND; Category: Capacitors; Features: -; Ratings: AEC-Q200; Package: 1206; Thickness (Max): 1.60MM; Operating Temperature: -55°C ~ 125°C
footprint C1206_1.60MM_MD
footprint C1206_1.60MM_HD
footprint C1206_1.60MM_LD
pins: 1, 2 1

## CGA5L1X7R1V106M160AE
designator C?, comment 10µF  Voltage - Rated: 35V
CAP CER 10UF 35V X7R 1206; Manufacturer Part Number: CGA5L1X7R1V106M160AE; Manufacturer: TDK Corporation; Tolerance: ±20%; Substitution Notes: 10µF , 35V , ±20% , X7R ,  , AEC-Q200 , 1206; Value: 10µF; Temperature Coefficient: X7R; ComponentLink1Description: Datasheet (Internal); ComponentLink1URL: datasheets\TDK\mlcc_automotive_general_en.pdf; ComponentLink2Description: Datasheet (External); ComponentLink2URL: https://product.tdk.com/info/en/catalog/datasheets/mlcc_automotive_general_en.pdf; Supplier 1: Digikey; Supplier Part Number 1: 445-172484-1-ND; Category: Capacitors; Features: Soft Termination; Ratings: AEC-Q200; Package: 1206; Thickness (Max): 1.90MM
footprint C1206_1.90MM_MD
footprint C1206_1.90MM_HD
footprint C1206_1.90MM_LD
pins: 1, 2 1

## ECS-.327-12.5-17X-TR
designator Y?
CRYSTAL 32.768KHZ 12.5PF SMD; Manufacturer: ECS Inc; CategorySort: 600; Frequency Tolerance: ±20ppm; ESR (Equivalent Series Resistance): 50 kOhm; Operating Mode: Fundamental; Value: ECS-.327-12.5-17X-TR; Sort Value: *; Category: Integrated Circuits; Supplier 1: Digi-Key; Supplier Part Number 1: XC1195CT-ND; Manufacturer Part Number: ECS-.327-12.5-17X-TR; RoHS: RoHS Compliant; Stock 1: 17619; Pricing 1: 1=1.31, 10=1.138, 50=0.9976, 100=0.7875, 500=0.665, 1000=0.525 (USD); Packaging: Cut Tape (CT); Type: kHz Crystal (Tuning Fork); Frequency: 32.768kHz; Frequency Stability: -; Load Capacitance: 12.5pF; Operating Temperature: -40°C ~ 85°C; Ratings: -; Mounting Type: Surface Mount; Package: 4-SOJ, 5.50mm pitch; Size / Dimension: 0.315" L x 0.150" W (8.00mm x 3.80mm); Height: 0.098" (2.50mm); ComponentLink1URL: http://www.ecsxtal.com/store/pdf/ecx-306x.pdf; ComponentLink1Description: http://www.ecsxtal.com/store/pdf/ecx-306x.pdf
footprint ECX-306
pins: 1 OSC1, 4 OSC2

## EEE-FK1E221P
designator C?, comment 220µF  Voltage Rating: 25V
CAP ALUM 220UF 25V 20% SMD; Manufacturer Part Number: EEE-FK1E221P; Manufacturer: Panasonic Electronic Components; Lifetime @ Temp#: 2000 Hrs @ 105°C; Ripple Current: 600mA; Impedance: 160 mOhm; Surface Mount Land Size: 0.327" L x 0.327" W (8.30mm x 8.30mm); Value_Voltage: 220µF  25V; Value: 220µF; Temperature Coefficient: Temperature Coefficient; ComponentLink1Description: Internal Datasheet; ComponentLink1URL: http://industrial.panasonic.com/www-cgi/jvcr13pz.cgi?E+PZ+3+ABA0120+EEEFK1E221P+7+WW; ComponentLink2Description: External Datasheet; ComponentLink2URL: http://industrial.panasonic.com/www-cgi/jvcr13pz.cgi?E+PZ+3+ABA0120+EEEFK1E221P+7+WW; Supplier 1: Digi-Key; Supplier Part Number 1: PCE3800CT-ND; Category: Capacitors; Sort Value: 220000000; Sort Value Package: F_220000000; Capacitance: 220µF; Tolerance: ±20%; Operating Temperature: -55°C ~ 105°C; Features: General Purpose; ESR (Equivalent Series Resistance): -; Mounting Type: Surface Mount; Package / Case: Radial- Can - SMD; Size / Dimension: 0.315" Dia (8.00mm); Height - Seated (Max): 0.402" (10.20mm); Lead Spacing: -; Packaging: Cut Tape (CT); Diameter: 8.00; Height: 10.20; Package: F; Ratings: AEC-Q200
footprint C_ALU_F
pins: 1, 2 1

## ERJ-3EKF15R0V
designator R?, comment 15
RES 15 OHM 1/10W 1% 0603 SMD; Manufacturer Part Number: ERJ-3EKF15R0V; Manufacturer: Panasonic Electronic Components; Package Power: 0603  (0.1W); Power (Watts): 0.1W- 1/10W; Temperature Coefficient: ±100ppm/°C; Limiting Element Voltage: 75; Maximum Overload Voltage: 150; Maximum Working Voltage: 1.2V; Substitution Notes: 15 , ±1% , 0603 , AEC-Q200; Value: 15; ComponentLink1Description: Internal Datasheet; ComponentLink1URL: datasheets\Panasonic Electronic Components\AOA0000CE2.pdf; ComponentLink2Description: External Datasheet; ComponentLink2URL: http://industrial.panasonic.com/www-data/pdf/AOA0000/AOA0000CE2.pdf; Supplier 1: Digi-Key; Supplier Part Number 1: P15.0HCT-ND; Category: Resistors; Resistance (Ohms): 15; Composition: Thick Film; Features: -; Tolerance: ±1%; Package: 0603 (1608 Metric); Supplier Package: 0603; Size / Dimension: 0.063" L x 0.031" W (1.60mm x 0.80mm); Height: 0.55MM; Number of Terminations: 2; Packaging: Cut Tape (CT); Sort Value: 15; Sort Value Package: 603_15; Ratings: AEC-Q200
footprint R0603_0.55MM_MD (Resistor 0603 Medium Density)
footprint R0603_0.55MM_HD
footprint R0603_0.55MM_LD
pins: 1, 2

## ERJ-3EKF33R0V
designator R?, comment 33
RES 33 OHM 1/10W 1% 0603 SMD; Manufacturer: Panasonic Electronic Components; Manufacturer Part Number: ERJ-3EKF33R0V; Power (Watts): 0.1W- 1/10W; Temperature Coefficient: ±100ppm/°C; Package Power: 0603  (0.1W); Limiting Element Voltage: 75; Maximum Overload Voltage: 150; Maximum Working Voltage: 1.8V; Substitution Notes: 33 , ±1% , 0603 , AEC-Q200; Value: 33; Supplier 1: Digi-Key; Supplier Part Number 1: P33.0HCT-ND; Category: Resistors; Sort Value: 33; Composition: Thick Film; Features: -; Tolerance: ±1%; Package: 0603 (1608 Metric); Size / Dimension: 0.063" L x 0.031" W (1.60mm x 0.80mm); Height: 0.55MM; Packaging: Cut Tape (CT); ComponentLink1URL: datasheets\Panasonic Electronic Components\AOA0000CE2.pdf; ComponentLink1Description: Internal Datasheet; ComponentLink2Description: External Datasheet; ComponentLink2URL: http://industrial.panasonic.com/www-data/pdf/AOA0000/AOA0000CE2.pdf; Resistance (Ohms): 33; Supplier Package: 0603; Number of Terminations: 2; Sort Value Package: 603_33; Ratings: AEC-Q200
footprint R0603_0.55MM_MD (Resistor 0603 Medium Density)
footprint R0603_0.55MM_HD
footprint R0603_0.55MM_LD
pins: 1, 2

## ERJ-3EKF51R0V
designator R?, comment 51
RES 51 OHM 1/10W 1% 0603 SMD; Manufacturer Part Number: ERJ-3EKF51R0V; Manufacturer: Panasonic Electronic Components; Package Power: 0603  (0.1W); Power (Watts): 0.1W- 1/10W; Temperature Coefficient: ±100ppm/°C; Limiting Element Voltage: 75; Maximum Overload Voltage: 150; Maximum Working Voltage: 2.3V; Substitution Notes: 51 , ±1% , 0603 , AEC-Q200; Value: 51; ComponentLink1Description: Internal Datasheet; ComponentLink1URL: datasheets\Panasonic Electronic Components\AOA0000CE2.pdf; ComponentLink2Description: External Datasheet; ComponentLink2URL: http://industrial.panasonic.com/www-data/pdf/AOA0000/AOA0000CE2.pdf; Supplier 1: Digi-Key; Supplier Part Number 1: P51.0HCT-ND; Category: Resistors; Resistance (Ohms): 51; Composition: Thick Film; Features: -; Tolerance: ±1%; Package: 0603 (1608 Metric); Supplier Package: 0603; Size / Dimension: 0.063" L x 0.031" W (1.60mm x 0.80mm); Height: 0.55MM; Number of Terminations: 2; Packaging: Cut Tape (CT); Sort Value: 51; Sort Value Package: 603_51; Ratings: AEC-Q200
footprint R0603_0.55MM_MD (Resistor 0603 Medium Density)
footprint R0603_0.55MM_HD
footprint R0603_0.55MM_LD
pins: 1, 2

## ERJ-3EKF1000V
designator R?, comment 100
RES 100 OHM 1/10W 1% 0603 SMD; Manufacturer Part Number: ERJ-3EKF1000V; Manufacturer: Panasonic Electronic Components; Package Power: 0603  (0.1W); Power (Watts): 0.1W- 1/10W; Temperature Coefficient: ±100ppm/°C; Limiting Element Voltage: 75; Maximum Overload Voltage: 150; Maximum Working Voltage: 3.2V; Substitution Notes: 100 , ±1% , 0603 , AEC-Q200; Value: 100; ComponentLink1Description: Internal Datasheet; ComponentLink1URL: datasheets\Panasonic Electronic Components\AOA0000CE2.pdf; ComponentLink2Description: External Datasheet; ComponentLink2URL: http://industrial.panasonic.com/www-data/pdf/AOA0000/AOA0000CE2.pdf; Supplier 1: Digi-Key; Supplier Part Number 1: P100HCT-ND; Category: Resistors; Resistance (Ohms): 100; Composition: Thick Film; Features: -; Tolerance: ±1%; Package: 0603 (1608 Metric); Supplier Package: 0603; Size / Dimension: 0.063" L x 0.031" W (1.60mm x 0.80mm); Height: 0.55MM; Number of Terminations: 2; Packaging: Cut Tape (CT); Sort Value: 100; Sort Value Package: 603_100; Ratings: AEC-Q200
footprint R0603_0.55MM_HD
footprint R0603_0.55MM_MD (Resistor 0603 Medium Density)
footprint R0603_0.55MM_LD
pins: 1, 2

## ERJ-3EKF1001V
designator R?, comment 1k
RES 1K OHM 1/10W 1% 0603 SMD; Manufacturer Part Number: ERJ-3EKF1001V; Manufacturer: Panasonic Electronic Components; Package Power: 0603  (0.1W); Power (Watts): 0.1W- 1/10W; Temperature Coefficient: ±100ppm/°C; Limiting Element Voltage: 75; Maximum Overload Voltage: 150; Maximum Working Voltage: 10.0V; Substitution Notes: 1k , ±1% , 0603 , AEC-Q200; Value: 1k; ComponentLink1Description: Internal Datasheet; ComponentLink1URL: datasheets\Panasonic Electronic Components\AOA0000CE2.pdf; ComponentLink2Description: External Datasheet; ComponentLink2URL: http://industrial.panasonic.com/www-data/pdf/AOA0000/AOA0000CE2.pdf; Supplier 1: Digi-Key; Supplier Part Number 1: P1.00KHCT-ND; Category: Resistors; Resistance (Ohms): 1k; Composition: Thick Film; Features: -; Tolerance: ±1%; Package: 0603 (1608 Metric); Supplier Package: 0603; Size / Dimension: 0.063" L x 0.031" W (1.60mm x 0.80mm); Height: 0.55MM; Number of Terminations: 2; Packaging: Cut Tape (CT); Sort Value: 1000; Sort Value Package: 603_1000; Ratings: AEC-Q200
footprint R0603_0.55MM_HD
footprint R0603_0.55MM_MD
footprint R0603_0.55MM_LD
pins: 1, 2

## ERJ-3EKF1002V
designator R?, comment 10k
RES 10K OHM 1/10W 1% 0603 SMD; Manufacturer Part Number: ERJ-3EKF1002V; Manufacturer: Panasonic Electronic Components; Package Power: 0603  (0.1W); Power (Watts): 0.1W- 1/10W; Temperature Coefficient: ±100ppm/°C; Limiting Element Voltage: 75; Maximum Overload Voltage: 150; Maximum Working Voltage: 31.6V; Substitution Notes: 10k , ±1% , 0603 , AEC-Q200; Value: 10k; ComponentLink1Description: Internal Datasheet; ComponentLink1URL: datasheets\Panasonic Electronic Components\AOA0000CE2.pdf; ComponentLink2Description: External Datasheet; ComponentLink2URL: http://industrial.panasonic.com/www-data/pdf/AOA0000/AOA0000CE2.pdf; Supplier 1: Digi-Key; Supplier Part Number 1: P10.0KHCT-ND; Category: Resistors; Resistance (Ohms): 10k; Composition: Thick Film; Features: -; Tolerance: ±1%; Package: 0603 (1608 Metric); Supplier Package: 0603; Size / Dimension: 0.063" L x 0.031" W (1.60mm x 0.80mm); Height: 0.55MM; Number of Terminations: 2; Packaging: Cut Tape (CT); Sort Value: 10000; Sort Value Package: 603_10000; Ratings: AEC-Q200
footprint R0603_0.55MM_MD
footprint R0603_0.55MM_HD
footprint R0603_0.55MM_LD
pins: 1, 2

## ERJ-3EKF1003V
designator R?, comment 100k
RES 100K OHM 1/10W 1% 0603 SMD; Manufacturer Part Number: ERJ-3EKF1003V; Manufacturer: Panasonic Electronic Components; Package Power: 0603  (0.1W); Power (Watts): 0.1W- 1/10W; Temperature Coefficient: ±100ppm/°C; Limiting Element Voltage: 75; Maximum Overload Voltage: 150; Maximum Working Voltage: 75.0V; Substitution Notes: 100k , ±1% , 0603 , AEC-Q200; Value: 100k; ComponentLink1Description: Internal Datasheet; ComponentLink1URL: datasheets\Panasonic Electronic Components\AOA0000CE2.pdf; ComponentLink2Description: External Datasheet; ComponentLink2URL: http://industrial.panasonic.com/www-data/pdf/AOA0000/AOA0000CE2.pdf; Supplier 1: Digi-Key; Supplier Part Number 1: P100KHCT-ND; Category: Resistors; Resistance (Ohms): 100k; Composition: Thick Film; Features: -; Tolerance: ±1%; Package: 0603 (1608 Metric); Supplier Package: 0603; Size / Dimension: 0.063" L x 0.031" W (1.60mm x 0.80mm); Height: 0.55MM; Number of Terminations: 2; Packaging: Cut Tape (CT); Sort Value: 100000; Sort Value Package: 603_100000; Ratings: AEC-Q200
footprint R0603_0.55MM_HD
footprint R0603_0.55MM_MD (Resistor 0603 Medium Density)
footprint R0603_0.55MM_LD
pins: 1, 2

## ERJ-3EKF1202V
designator R?, comment 12k
RES 12K OHM 1/10W 1% 0603 SMD; Manufacturer: Panasonic Electronic Components; Manufacturer Part Number: ERJ-3EKF1202V; Power (Watts): 0.1W- 1/10W; Temperature Coefficient: ±100ppm/°C; Package Power: 0603  (0.1W); Limiting Element Voltage: 75; Maximum Overload Voltage: 150; Maximum Working Voltage: 34.6V; Substitution Notes: 12k , ±1% , 0603 , AEC-Q200; Value: 12k; Supplier 1: Digi-Key; Supplier Part Number 1: P12.0KHCT-ND; Category: Resistors; Sort Value: 12000; Composition: Thick Film; Features: -; Tolerance: ±1%; Package: 0603 (1608 Metric); Size / Dimension: 0.063" L x 0.031" W (1.60mm x 0.80mm); Height: 0.55MM; Packaging: Cut Tape (CT); ComponentLink1URL: datasheets\Panasonic Electronic Components\AOA0000CE2.pdf; ComponentLink1Description: Internal Datasheet; ComponentLink2Description: External Datasheet; ComponentLink2URL: http://industrial.panasonic.com/www-data/pdf/AOA0000/AOA0000CE2.pdf; Resistance (Ohms): 12k; Supplier Package: 0603; Number of Terminations: 2; Sort Value Package: 603_12000; Ratings: AEC-Q200
footprint R0603_0.55MM_MD
footprint R0603_0.55MM_HD
footprint R0603_0.55MM_LD
pins: 1, 2

## ERJ-3EKF1502V
designator R?, comment 15k
RES 15K OHM 1/10W 1% 0603 SMD; Manufacturer: Panasonic Electronic Components; Manufacturer Part Number: ERJ-3EKF1502V; Power (Watts): 0.1W- 1/10W; Temperature Coefficient: ±100ppm/°C; Package Power: 0603  (0.1W); Limiting Element Voltage: 75; Maximum Overload Voltage: 150; Maximum Working Voltage: 38.7V; Substitution Notes: 15k , ±1% , 0603 , AEC-Q200; Value: 15k; Supplier 1: Digi-Key; Supplier Part Number 1: P15.0KHCT-ND; Category: Resistors; Sort Value: 15000; Composition: Thick Film; Features: -; Tolerance: ±1%; Package: 0603 (1608 Metric); Size / Dimension: 0.063" L x 0.031" W (1.60mm x 0.80mm); Height: 0.55MM; Packaging: Cut Tape (CT); ComponentLink1URL: datasheets\Panasonic Electronic Components\AOA0000CE2.pdf; ComponentLink1Description: Internal Datasheet; ComponentLink2Description: External Datasheet; ComponentLink2URL: http://industrial.panasonic.com/www-data/pdf/AOA0000/AOA0000CE2.pdf; Resistance (Ohms): 15k; Supplier Package: 0603; Number of Terminations: 2; Sort Value Package: 603_15000; Ratings: AEC-Q200
footprint R0603_0.55MM_MD (Resistor 0603 Medium Density)
footprint R0603_0.55MM_HD
footprint R0603_0.55MM_LD
pins: 1, 2

## ERJ-3EKF2201V
designator R?, comment 2.2k
RES 2.2K OHM 1/10W 1% 0603 SMD; Manufacturer Part Number: ERJ-3EKF2201V; Manufacturer: Panasonic Electronic Components; Package Power: 0603  (0.1W); Power (Watts): 0.1W- 1/10W; Temperature Coefficient: ±100ppm/°C; Limiting Element Voltage: 75; Maximum Overload Voltage: 150; Maximum Working Voltage: 14.8V; Substitution Notes: 2.2k , ±1% , 0603 , AEC-Q200; Value: 2.2k; ComponentLink1Description: Internal Datasheet; ComponentLink1URL: datasheets\Panasonic Electronic Components\AOA0000CE2.pdf; ComponentLink2Description: External Datasheet; ComponentLink2URL: http://industrial.panasonic.com/www-data/pdf/AOA0000/AOA0000CE2.pdf; Supplier 1: Digi-Key; Supplier Part Number 1: P2.20KHCT-ND; Category: Resistors; Resistance (Ohms): 2.2k; Composition: Thick Film; Features: -; Tolerance: ±1%; Package: 0603 (1608 Metric); Supplier Package: 0603; Size / Dimension: 0.063" L x 0.031" W (1.60mm x 0.80mm); Height: 0.55MM; Number of Terminations: 2; Packaging: Cut Tape (CT); Sort Value: 2200; Sort Value Package: 603_2200; Ratings: AEC-Q200
footprint R0603_0.55MM_MD
footprint R0603_0.55MM_HD
footprint R0603_0.55MM_LD
pins: 1, 2

## ERJ-3EKF2492V
designator R?, comment 24.9k
RES 24.9K OHM 1/10W 1% 0603 SMD; Manufacturer Part Number: ERJ-3EKF2492V; Manufacturer: Panasonic Electronic Components; Package Power: 0603  (0.1W); Power (Watts): 0.1W- 1/10W; Temperature Coefficient: ±100ppm/°C; Limiting Element Voltage: 75; Maximum Overload Voltage: 150; Maximum Working Voltage: 49.9V; Substitution Notes: 24.9k , ±1% , 0603 , AEC-Q200; Value: 24.9k; ComponentLink1Description: Internal Datasheet; ComponentLink1URL: datasheets\Panasonic Electronic Components\AOA0000CE2.pdf; ComponentLink2Description: External Datasheet; ComponentLink2URL: http://industrial.panasonic.com/www-data/pdf/AOA0000/AOA0000CE2.pdf; Supplier 1: Digi-Key; Supplier Part Number 1: P24.9KHCT-ND; Category: Resistors; Resistance (Ohms): 24.9k; Composition: Thick Film; Features: -; Tolerance: ±1%; Package: 0603 (1608 Metric); Supplier Package: 0603; Size / Dimension: 0.063" L x 0.031" W (1.60mm x 0.80mm); Height: 0.55MM; Number of Terminations: 2; Packaging: Cut Tape (CT); Sort Value: 24900; Sort Value Package: 603_24900; Ratings: AEC-Q200
footprint R0603_0.55MM_MD (Resistor 0603 Medium Density)
footprint R0603_0.55MM_HD
footprint R0603_0.55MM_LD
pins: 1, 2

## ERJ-3EKF3921V
designator R?, comment 3.92k
RES 3.92K OHM 1/10W 1% 0603 SMD; Manufacturer Part Number: ERJ-3EKF3921V; Manufacturer: Panasonic Electronic Components; Package Power: 0603  (0.1W); Power (Watts): 0.1W- 1/10W; Temperature Coefficient: ±100ppm/°C; Limiting Element Voltage: 75; Maximum Overload Voltage: 150; Maximum Working Voltage: 19.8V; Substitution Notes: 3.92k , ±1% , 0603 , AEC-Q200; Value: 3.92k; ComponentLink1Description: Internal Datasheet; ComponentLink1URL: datasheets\Panasonic Electronic Components\AOA0000CE2.pdf; ComponentLink2Description: External Datasheet; ComponentLink2URL: http://industrial.panasonic.com/www-data/pdf/AOA0000/AOA0000CE2.pdf; Supplier 1: Digi-Key; Supplier Part Number 1: P3.92KHCT-ND; Category: Resistors; Resistance (Ohms): 3.92k; Composition: Thick Film; Features: -; Tolerance: ±1%; Package: 0603 (1608 Metric); Supplier Package: 0603; Size / Dimension: 0.063" L x 0.031" W (1.60mm x 0.80mm); Height: 0.55MM; Number of Terminations: 2; Packaging: Cut Tape (CT); Sort Value: 3920; Sort Value Package: 603_3920; Ratings: AEC-Q200
footprint R0603_0.55MM_MD (Resistor 0603 Medium Density)
footprint R0603_0.55MM_HD
footprint R0603_0.55MM_LD
pins: 1, 2

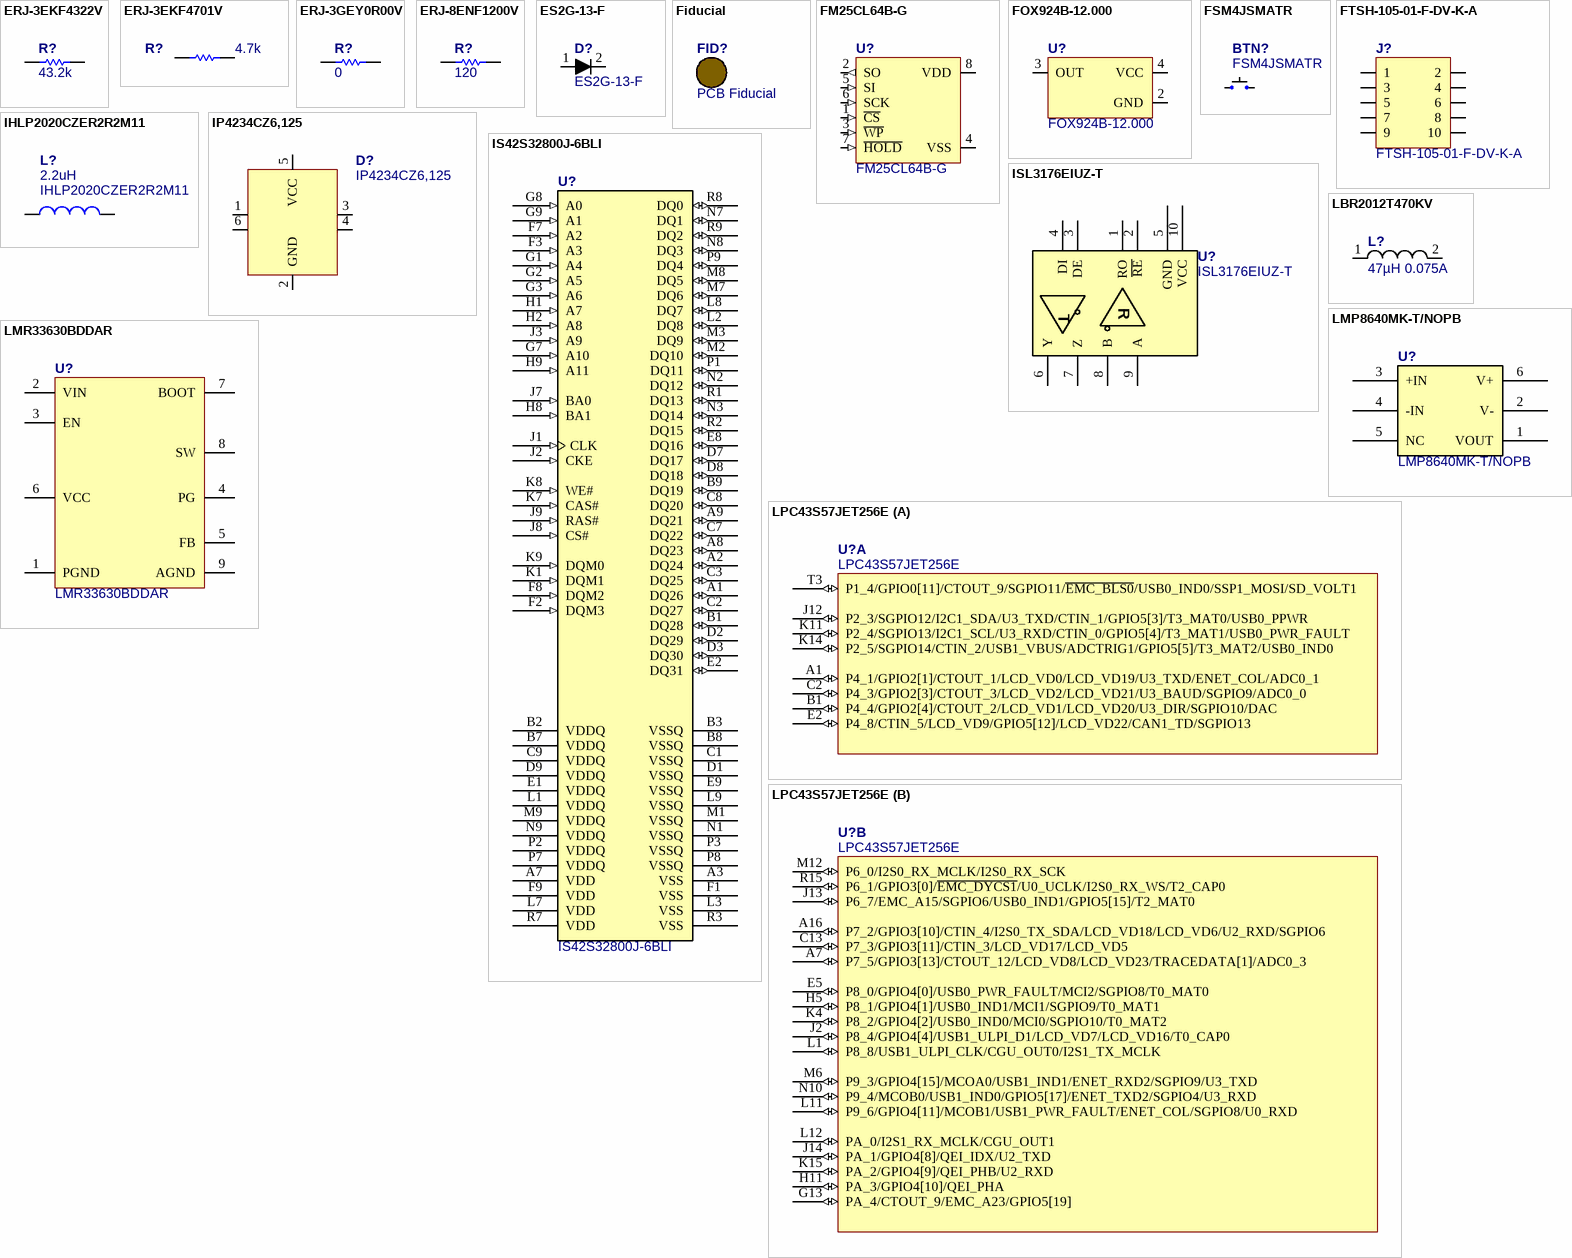
[diagram p1: symbols ERJ-3EKF4322V to LPC43S57JET256E]